# EAGLE library part CA3046 (library madhu)
NPN Transistor Array
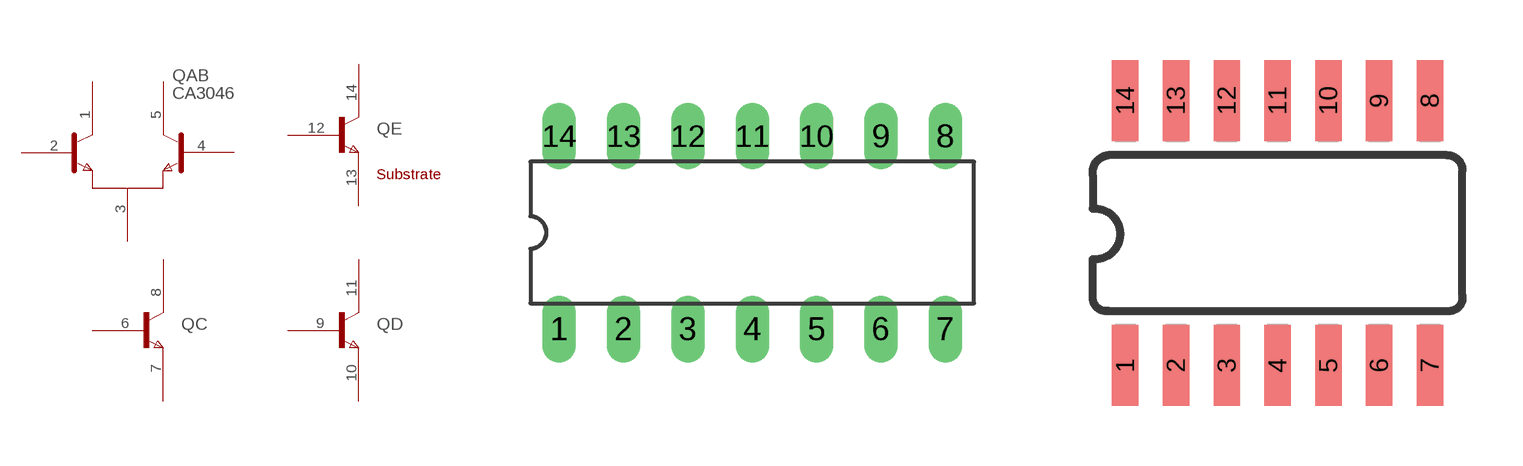
[diagram p7: symbol with the pads of DIL14; footprints DIL14, SOIC-14]

Designator prefix Q; gates AB=NPN-D C=NPN-NV D=NPN-NV E=NPN-SUB

## CA3046  [DIL14]
1  AB:C1  pas
2  AB:B1  pas
3  AB:E  pas
4  AB:B2  pas
5  AB:C2  pas
6  C:B  pas
7  C:E  pas
8  C:C  pas
9  D:B  pas
10  D:E  pas
11  D:C  pas
12  E:B  pas
13  E:E  pas
14  E:C  pas

## CA3046M  [SOIC-14]
Pads as for DIL14

## Footprint DIL14 (pad centres in mm)
Dual In Line 14
drill 0.813 long: 1 -7.62,-3.81; 2 -5.08,-3.81; 3 -2.54,-3.81; 4 0,-3.81; 5 2.54,-3.81; 6 5.08,-3.81; 7 7.62,-3.81; 8 7.62,3.81; 9 5.08,3.81; 10 2.54,3.81; 11 0,3.81; 12 -2.54,3.81; 13 -5.08,3.81; 14 -7.62,3.81

## Footprint SOIC-14 (pad centres in mm)
SOIC 14 pin
smd 0.66 x 2.032: 1 -4.445,-3.315; 2 -3.175,-3.315; 3 -1.905,-3.315; 4 -0.635,-3.315; 5 0.635,-3.315; 6 1.905,-3.315; 7 3.175,-3.315; 8 3.175,3.315; 9 1.905,3.315; 10 0.635,3.315; 11 -0.635,3.315; 12 -1.905,3.315; 13 -3.175,3.315; 14 -4.445,3.315